# Altium schematic symbol library LP5907MFX-1.2_NOPB.SchLib: 1 symbol
Pins are listed as number, name and electrical type; pins without a type are passive.

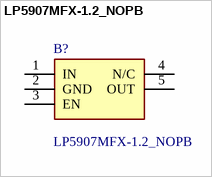
[diagram p0: symbol LP5907MFX-1.2_NOPB]

## LP5907MFX-1.2_NOPB
designator B?
250-mA ultra-low-noise low-IQ low-dropout (LDO) linear regulator; Manufacturer_Name: Texas Instruments; Manufacturer_Part_Number: LP5907MFX-1.2/NOPB; Geometry.Height: 1.45mm; Mouser Part Number: 595-LP5907MFX-1.2NPB; Mouser Price/Stock: https://www.mouser.co.uk/ProductDetail/Texas-Instruments/LP5907MFX-1.2-NOPB?qs=biyDIajrTn6fEGO4pqL3pA%3D%3D; Arrow Part Number: LP5907MFX-1.2/NOPB; Arrow Price/Stock: https://www.arrow.com/en/products/lp5907mfx-1.2nopb/texas-instruments?utm_currency=USD&region=nac; Datasheet Link: http://www.ti.com/lit/gpn/lp5907
footprint SOT95P280X145-5N
pins: 1 IN, 2 GND, 3 EN, 4 N/C, 5 OUT